# Altium footprint library WR-DSUB.PcbLib: 64 footprints (part 4 of 4)
Each footprint in its own frame and in the unit in brackets; x right, y up, seen from the top. Pads: shape width x height; smd on the part's side, far side on the other; paste and mask are expansions set on the pad; w line width, h text height; cw(c..) or ccw(c..) is an arc to the next point about the centre after c.
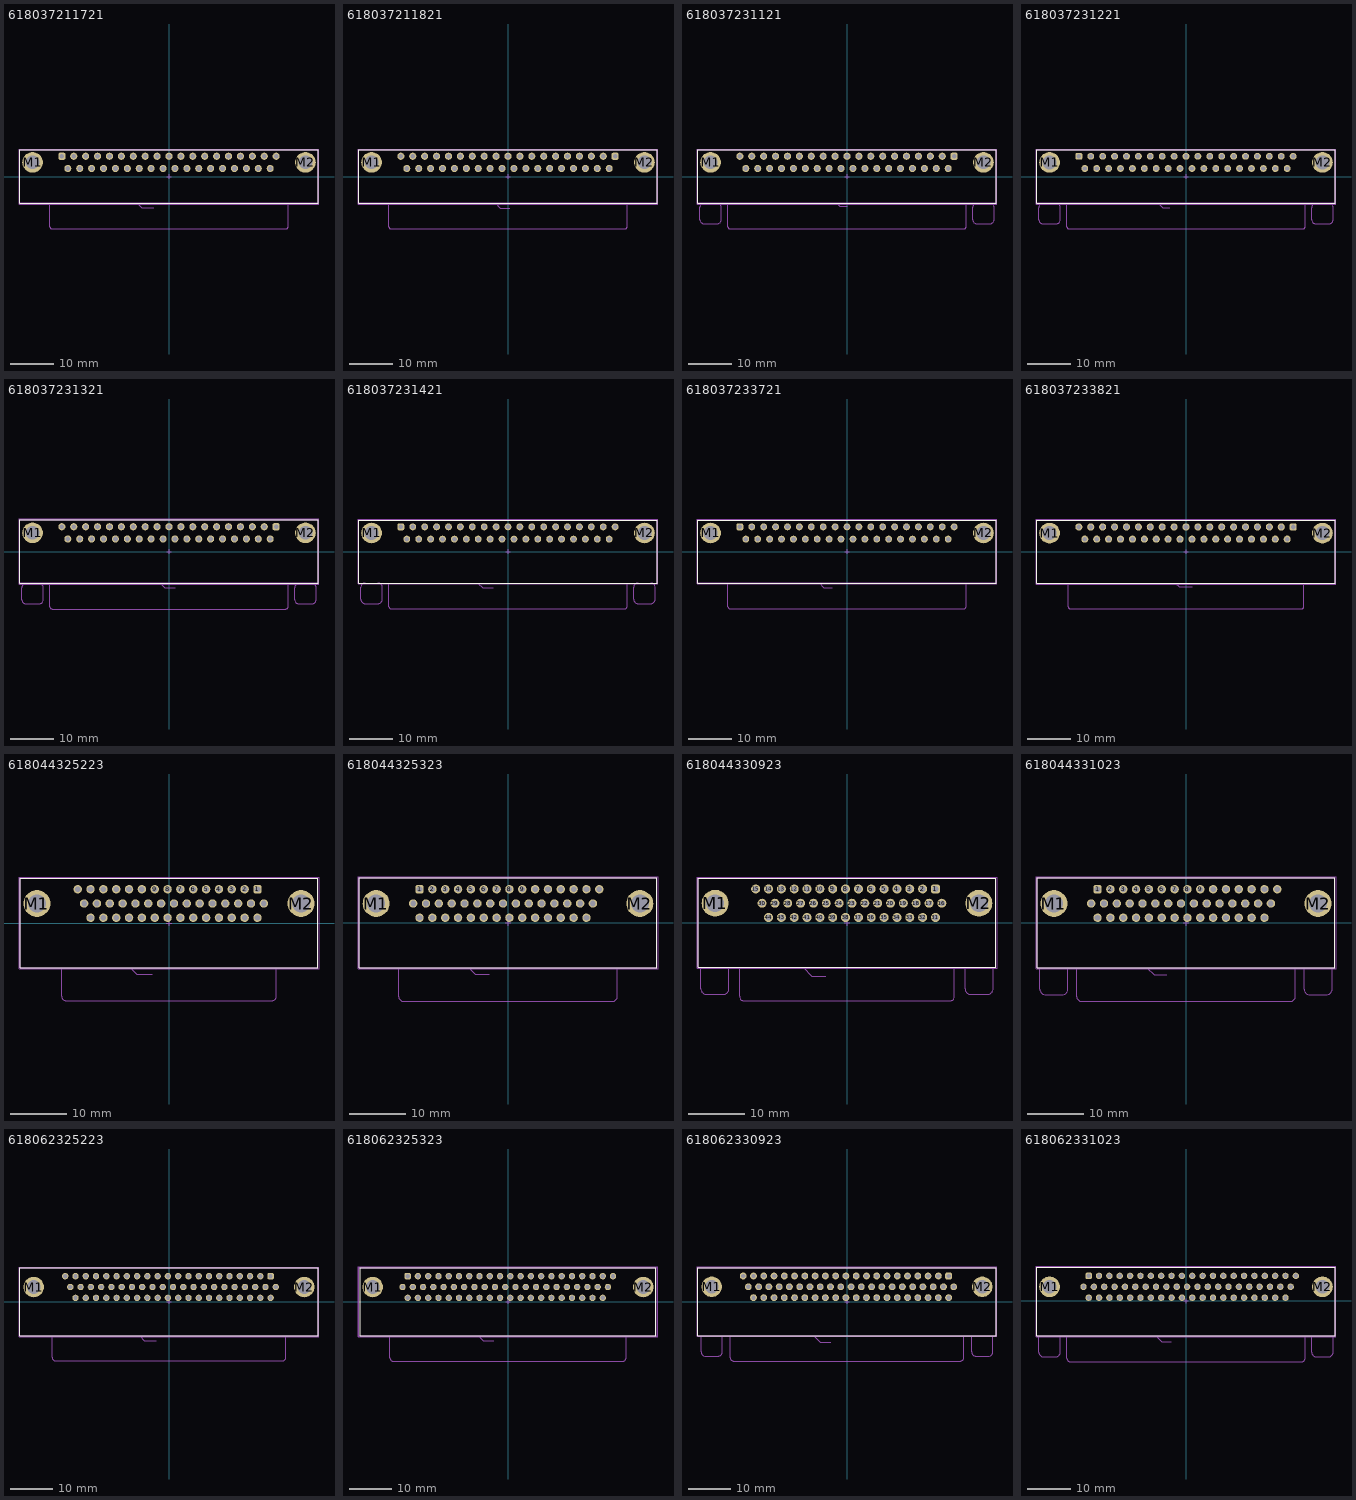
[diagram p3: the footprints below, top view; thin cyan lines are the x and y axes]

## 618037211721 [mm] "37 pins, right angled, 8.08mm, board lock & UNC4-40 rivet without hex screw"
height 12.5
pads (39):
  rrect50% 1.65x1.65 hole 1.09: 1(-24.93,4.72)
  round 1.65 hole 1.09: 2(-22.16,4.72) 3(-19.39,4.72) 4(-16.62,4.72) 5(-13.85,4.72) 6(-11.08,4.72) 7(-8.31,4.72) 8(-5.54,4.72) 9(-2.77,4.72) 10(0,4.72) 11(2.77,4.72) 12(5.54,4.72) 13(8.31,4.72) 14(11.08,4.72) 15(13.85,4.72) 16(16.62,4.72) 17(19.39,4.72) 18(22.16,4.72) 19(24.93,4.72) 20(-23.545,1.88) 21(-20.775,1.88) 22(-18.005,1.88) 23(-15.235,1.88) 24(-12.465,1.88) 25(-9.695,1.88) 26(-6.925,1.88) 27(-4.155,1.88) 28(-1.385,1.88) 29(1.385,1.88) 30(4.155,1.88) 31(6.925,1.88) 32(9.695,1.88) 33(12.465,1.88) 34(15.235,1.88) 35(18.005,1.88) 36(20.775,1.88) 37(23.545,1.88)
  round 4.8 hole 3.2: M1(-31.75,3.3) M2(31.75,3.3)
Top Overlay:
  lines w0.2: -34.7,-6.2 34.7,-6.2 34.7,6.2 -34.7,6.2 -34.7,-6.2
Assembly Notes:
  lines w0.2: -34.7,-6.12 34.7,-6.12 ; -7.5,-6.12 -6.32,-7.3 -3.6,-7.3
  text "PCB Edge" at -3.1,-7.8 h1.02
Top Assembly:
  lines w0.1: -27.71,-6.2 -27.71,-11.7 ccw(c-27.21,-11.7) -27.21,-12.2 27.21,-12.2 ccw(c27.21,-11.7) 27.71,-11.7 27.71,-6.2 ; -34.7,-6.2 -34.7,6.2 34.7,6.2 34.7,-6.2 -34.7,-6.2
Top Designator:
  text ".Designator" at -3.647,-0.357 h1
Top Courtyard:
  lines w0.05: -34.9,-6.4 34.9,-6.4 34.9,6.4 -34.9,6.4 -34.9,-6.4
Top Component Center:
  lines w0.1: -0.5,0 0.5,0 ; 0,-0.5 0,0.5
3D body "618037211721.stp": height 12.55, standoff -3.95, extent -34.7,-12.2 34.7,6.2

## 618037211821 [mm] "37p 8.08mm bracket, board lock & UNC4-40 Rivet without hex screw"
height 12.5
pads (39):
  rrect50% 1.65x1.65 hole 1.09: 1(24.93,4.72)
  round 1.65 hole 1.09: 2(22.16,4.72) 3(19.39,4.72) 4(16.62,4.72) 5(13.85,4.72) 6(11.08,4.72) 7(8.31,4.72) 8(5.54,4.72) 9(2.77,4.72) 10(0,4.72) 11(-2.77,4.72) 12(-5.54,4.72) 13(-8.31,4.72) 14(-11.08,4.72) 15(-13.85,4.72) 16(-16.62,4.72) 17(-19.39,4.72) 18(-22.16,4.72) 19(-24.93,4.72) 20(23.545,1.88) 21(20.775,1.88) 22(18.005,1.88) 23(15.235,1.88) 24(12.465,1.88) 25(9.695,1.88) 26(6.925,1.88) 27(4.155,1.88) 28(1.385,1.88) 29(-1.385,1.88) 30(-4.155,1.88) 31(-6.925,1.88) 32(-9.695,1.88) 33(-12.465,1.88) 34(-15.235,1.88) 35(-18.005,1.88) 36(-20.775,1.88) 37(-23.545,1.88)
  round 4.8 hole 3.2: M1(-31.75,3.3) M2(31.75,3.3)
Top Overlay:
  lines w0.2: -34.7,-6.2 34.7,-6.2 34.7,6.2 -34.7,6.2 -34.7,-6.2
Assembly Notes:
  lines w0.2: -34.7,-6.12 34.7,-6.12 ; -3,-6.12 -1.77,-7.35 0.4,-7.35
  text "PCB Edge" at 0.7,-8.05 h1.02
Top Assembly:
  lines w0.1: -27.7,-6.2 -27.7,-11.7 ccw(c-27.2,-11.7) -27.2,-12.2 ; -27.25,-12.2 27.2,-12.2 ccw(c27.2,-11.7) 27.7,-11.7 27.7,-6.2 ; -34.7,-6.2 -34.7,6.2 34.7,6.2 34.7,-6.2 -34.7,-6.2
Top Designator:
  text ".Designator" at -3.647,-0.357 h1
Top Courtyard:
  lines w0.05: -34.9,-6.4 34.9,-6.4 34.9,6.4 -34.9,6.4 -34.9,-6.4
Top Component Center:
  lines w0.1: -0.5,0 0.5,0 ; 0,-0.5 0,0.5
3D body "618037211821.stp": height 12.55, standoff -3.95, extent -34.7,-12.2 34.7,6.2

## 618037231121 [mm] "37 pins, right angled, 8.08mm, with hex screw"
height 12.5
pads (39):
  rrect50% 1.65x1.65 hole 1.09: 1(24.93,4.72)
  round 1.65 hole 1.09: 2(22.16,4.72) 3(19.39,4.72) 4(16.62,4.72) 5(13.85,4.72) 6(11.08,4.72) 7(8.31,4.72) 8(5.54,4.72) 9(2.77,4.72) 10(0,4.72) 11(-2.77,4.72) 12(-5.54,4.72) 13(-8.31,4.72) 14(-11.08,4.72) 15(-13.85,4.72) 16(-16.62,4.72) 17(-19.39,4.72) 18(-22.16,4.72) 19(-24.93,4.72) 20(23.545,1.88) 21(20.775,1.88) 22(18.005,1.88) 23(15.235,1.88) 24(12.465,1.88) 25(9.695,1.88) 26(6.925,1.88) 27(4.155,1.88) 28(1.385,1.88) 29(-1.385,1.88) 30(-4.155,1.88) 31(-6.925,1.88) 32(-9.695,1.88) 33(-12.465,1.88) 34(-15.235,1.88) 35(-18.005,1.88) 36(-20.775,1.88) 37(-23.545,1.88)
  round 4.8 hole 3.2: M1(-31.75,3.3) M2(31.75,3.3)
Top Overlay:
  lines w0.2: -34.7,-6.2 34.7,-6.2 34.7,6.2 -34.7,6.2 -34.7,-6.2
Assembly Notes:
  lines w0.2: -34.7,-6.12 34.7,-6.12 ; -2.5,-6.12 -1.67,-6.95 0,-6.95
  text "PCB Edge" at 0.4,-7.55 h1.02
Top Assembly:
  lines w0.1: -33.25,-6.2 ccw(c-33.25,-7.2) -34.25,-7.2 -34.25,-10 ccw(c-33.25,-10) -33.25,-11 -30.25,-11 ccw(c-30.25,-10) -29.25,-10 -29.25,-7.2 ccw(c-30.25,-7.2) -30.25,-6.2 ; -27.7,-6.2 -27.7,-11.7 ccw(c-27.2,-11.7) -27.2,-12.2 27.2,-12.2 ccw(c27.2,-11.7) 27.7,-11.7 27.7,-6.2 ; 30.25,-6.2 ccw(c30.25,-7.2) 29.25,-7.2 29.25,-10 ccw(c30.25,-10) 30.25,-11 33.25,-11 ccw(c33.25,-10) 34.25,-10 34.25,-7.2 ccw(c33.25,-7.2) 33.25,-6.2 ; -34.7,-6.2 34.7,-6.2 34.7,6.25 -34.7,6.25 -34.7,-6.2 ; 18.81,-12.2 18.81,-12.2
Top Designator:
  text ".Designator" at -3.647,-0.357 h1
Top Courtyard:
  lines w0.05: -34.9,-6.4 -34.9,6.4 34.9,6.4 34.9,-6.4 -34.9,-6.4
Top Component Center:
  lines w0.1: -0.5,0 0.5,0 ; 0,-0.5 0,0.5
3D body "618037231121.stp": height 12.55, standoff -3.95, extent -34.7,-12.15 34.7,6.25

## 618037231221 [mm] "37 pins, right angled, 8.08mm, with hex screw"
height 12.5
pads (39):
  rrect50% 1.6x1.6 hole 1.04: 1(-24.93,4.72)
  round 1.6 hole 1.04: 2(-22.16,4.72) 3(-19.39,4.72) 4(-16.62,4.72) 5(-13.85,4.72) 6(-11.08,4.72) 7(-8.31,4.72) 8(-5.54,4.72) 9(-2.77,4.72) 10(0,4.72) 11(2.77,4.72) 12(5.54,4.72) 13(8.31,4.72) 14(11.08,4.72) 15(13.85,4.72) 16(16.62,4.72) 17(19.39,4.72) 18(22.16,4.72) 19(24.93,4.72) 20(-23.545,1.88) 21(-20.775,1.88) 22(-18.005,1.88) 23(-15.235,1.88) 24(-12.465,1.88) 25(-9.695,1.88) 26(-6.925,1.88) 27(-4.155,1.88) 28(-1.385,1.88) 29(1.385,1.88) 30(4.155,1.88) 31(6.925,1.88) 32(9.695,1.88) 33(12.465,1.88) 34(15.235,1.88) 35(18.005,1.88) 36(20.775,1.88) 37(23.545,1.88)
  round 4.8 hole 3.2: M1(-31.75,3.3) M2(31.75,3.3)
Top Overlay:
  lines w0.2: -34.7,-6.2 34.7,-6.2 34.7,6.2 -34.7,6.2 -34.7,-6.2
Assembly Notes:
  lines w0.2: -34.7,-6.12 34.7,-6.12 ; -6.6,-6.12 -5.42,-7.3 -3.8,-7.3
  text "PCB Edge" at -3.4,-7.82 h1.02
Top Assembly:
  lines w0.1: -33.25,-6.2 ccw(c-33.25,-7.2) -34.25,-7.2 -34.25,-10 ccw(c-33.25,-10) -33.25,-11 -30.25,-11 ccw(c-30.25,-10) -29.25,-10 -29.25,-7.2 ccw(c-30.25,-7.2) -30.25,-6.2 ; -27.71,-6.2 -27.71,-11.68 ccw(c-27.21,-11.68) -27.21,-12.18 27.21,-12.18 ccw(c27.21,-11.68) 27.71,-11.68 27.71,-6.2 ; 30.25,-6.2 ccw(c30.25,-7.2) 29.25,-7.2 29.25,-10 ccw(c30.25,-10) 30.25,-11 33.25,-11 ccw(c33.25,-10) 34.25,-10 34.25,-7.2 ccw(c33.25,-7.2) 33.25,-6.2 ; -34.7,-6.2 -34.7,6.2 34.7,6.2 34.7,-6.2 -34.7,-6.2
Top Designator:
  text ".Designator" at -3.647,-0.357 h1
Top Courtyard:
  lines w0.05: -34.9,-6.4 -34.9,6.4 34.9,6.4 34.9,-6.4 -34.9,-6.4
Top Component Center:
  lines w0.1: -0.5,0 0.5,0 ; 0,-0.5 0,0.5
3D body "618037231221.stp": height 12.55, standoff -3.95, extent -34.7,-12.2 34.7,6.2

## 618037231321 [mm] "37 pins, right angled, 10.3mm, with hex screw"
height 12.5
pads (39):
  rrect50% 1.65x1.65 hole 1.09: 1(24.93,5.78)
  round 1.65 hole 1.09: 2(22.16,5.78) 3(19.39,5.78) 4(16.62,5.78) 5(13.85,5.78) 6(11.08,5.78) 7(8.31,5.78) 8(5.54,5.78) 9(2.77,5.78) 10(0,5.78) 11(-2.77,5.78) 12(-5.54,5.78) 13(-8.31,5.78) 14(-11.08,5.78) 15(-13.85,5.78) 16(-16.62,5.78) 17(-19.39,5.78) 18(-22.16,5.78) 19(-24.93,5.78) 20(23.545,2.94) 21(20.775,2.94) 22(18.005,2.94) 23(15.235,2.94) 24(12.465,2.94) 25(9.695,2.94) 26(6.925,2.94) 27(4.155,2.94) 28(1.385,2.94) 29(-1.385,2.94) 30(-4.155,2.94) 31(-6.925,2.94) 32(-9.695,2.94) 33(-12.465,2.94) 34(-15.235,2.94) 35(-18.005,2.94) 36(-20.775,2.94) 37(-23.545,2.94)
  round 4.8 hole 3.2: M1(-31.75,4.36) M2(31.75,4.36)
Top Overlay:
  lines w0.2: -34.7,-7.36 34.7,-7.36 34.7,7.37 -34.7,7.37 -34.7,-7.36
Assembly Notes:
  lines w0.2: -34.7,-7.26 34.7,-7.26 ; -2.1,-7.26 -0.96,-8.4 1.4,-8.4
  text "PCB Edge" at 1.8,-8.8 h1.02
Top Assembly:
  lines w0.1: -33.25,-7.36 ccw(c-33.25,-8.36) -34.25,-8.36 -34.25,-11.16 ccw(c-33.25,-11.16) -33.25,-12.16 -30.25,-12.16 ccw(c-30.25,-11.16) -29.25,-11.16 -29.25,-8.36 ccw(c-30.25,-8.36) -30.25,-7.36 ; -27.7,-7.36 -27.7,-12.86 ccw(c-27.2,-12.86) -27.2,-13.36 27.2,-13.36 ; 27.7,-7.36 27.7,-12.86 cw(c27.2,-12.86) 27.2,-13.36 ; 30.25,-7.36 ccw(c30.25,-8.36) 29.25,-8.36 29.25,-11.16 ccw(c30.25,-11.16) 30.25,-12.16 33.25,-12.16 ccw(c33.25,-11.16) 34.25,-11.16 34.25,-8.36 ccw(c33.25,-8.36) 33.25,-7.36 ; 27.2,-13.36 27.2,-13.36 ; -34.7,-7.36 -34.7,7.37 34.7,7.37 34.7,-7.36 -34.7,-7.36
Top Designator:
  text ".Designator" at -3.647,-0.357 h1
Top Courtyard:
  lines w0.05: -34.9,-7.59 -34.9,7.59 34.9,7.59 34.9,-7.59 -34.9,-7.59
Top Component Center:
  lines w0.1: -0.5,0 0.5,0 ; 0,-0.5 0,0.5
3D body "618037231321.stp": height 12.57, standoff -3.77, extent -34.66,-13.28 34.66,7.37

## 618037231421 [mm] "37 pins, right angled, 10.3mm, with hex screw"
height 12.5
pads (39):
  rrect50% 1.6x1.6 hole 1.09: 1(-24.93,5.735)
  round 1.6 hole 1.09: 2(-22.16,5.735) 3(-19.39,5.735) 4(-16.62,5.735) 5(-13.85,5.735) 6(-11.08,5.735) 7(-8.31,5.735) 8(-5.54,5.735) 9(-2.77,5.735) 10(0,5.735) 11(2.77,5.735) 12(5.54,5.735) 13(8.31,5.735) 14(11.08,5.735) 15(13.85,5.735) 16(16.62,5.735) 17(19.39,5.735) 18(22.16,5.735) 19(24.93,5.735) 20(-23.545,2.895) 21(-20.775,2.895) 22(-18.005,2.895) 23(-15.235,2.895) 24(-12.465,2.895) 25(-9.695,2.895) 26(-6.925,2.895) 27(-4.155,2.895) 28(-1.385,2.895) 29(1.385,2.895) 30(4.155,2.895) 31(6.925,2.895) 32(9.695,2.895) 33(12.465,2.895) 34(15.235,2.895) 35(18.005,2.895) 36(20.775,2.895) 37(23.545,2.895)
  round 4.8 hole 3.2: M1(-31.75,4.315) M2(31.75,4.315)
Top Overlay:
  lines w0.2: -34.7,-7.325 -34.7,7.325 34.7,7.325 34.7,-7.325 -34.7,-7.325
Assembly Notes:
  lines w0.2: -34.7,-7.325 34.7,-7.325 ; -7,-7.325 -5.905,-8.42 -3.4,-8.42
  text "PCB Edge" at -3.1,-8.92 h1.02
Top Assembly:
  lines w0.1: -33.25,-7.325 ccw(c-33.25,-8.325) -34.25,-8.325 -34.25,-11.125 ccw(c-33.25,-11.125) -33.25,-12.125 -30.25,-12.125 ccw(c-30.25,-11.125) -29.25,-11.125 -29.25,-8.325 ccw(c-30.25,-8.325) -30.25,-7.325 ; -27.71,-7.325 -27.71,-12.825 ccw(c-27.21,-12.825) -27.21,-13.325 27.21,-13.325 ccw(c27.21,-12.825) 27.71,-12.825 27.71,-7.325 ; 30.25,-7.325 ccw(c30.25,-8.325) 29.25,-8.325 29.25,-11.125 ccw(c30.25,-11.125) 30.25,-12.125 33.25,-12.125 ccw(c33.25,-11.125) 34.25,-11.125 34.25,-8.325 ccw(c33.25,-8.325) 33.25,-7.325 ; -34.7,-7.325 34.7,-7.325 34.7,7.325 -34.7,7.325 -34.7,-7.325
Top Designator:
  text ".Designator" at -3.647,-0.357 h1
Top Courtyard:
  lines w0.05: -34.9,-7.525 34.9,-7.525 34.9,7.525 -34.9,7.525 -34.9,-7.525
Top Component Center:
  lines w0.1: -0.5,0 0.5,0 ; 0,-0.5 0,0.5
3D body "618037231421.stp": height 12.62, standoff -3.72, extent -34.66,-13.355 34.66,7.295

## 618037233721 [mm] "37 pins, right angled, 10.3mm, board lock & UNC4-40 rivet without hex screw"
height 12.5
pads (39):
  rrect50% 1.6x1.6 hole 1.09: 1(-24.93,5.735)
  round 1.6 hole 1.09: 2(-22.16,5.735) 3(-19.39,5.735) 4(-16.62,5.735) 5(-13.85,5.735) 6(-11.08,5.735) 7(-8.31,5.735) 8(-5.54,5.735) 9(-2.77,5.735) 10(0,5.735) 11(2.77,5.735) 12(5.54,5.735) 13(8.31,5.735) 14(11.08,5.735) 15(13.85,5.735) 16(16.62,5.735) 17(19.39,5.735) 18(22.16,5.735) 19(24.93,5.735) 20(-23.545,2.895) 21(-20.775,2.895) 22(-18.005,2.895) 23(-15.235,2.895) 24(-12.465,2.895) 25(-9.695,2.895) 26(-6.925,2.895) 27(-4.155,2.895) 28(-1.385,2.895) 29(1.385,2.895) 30(4.155,2.895) 31(6.925,2.895) 32(9.695,2.895) 33(12.465,2.895) 34(15.235,2.895) 35(18.005,2.895) 36(20.775,2.895) 37(23.545,2.895)
  round 4.8 hole 3.2: M1(-31.75,4.315) M2(31.75,4.315)
Top Overlay:
  lines w0.2: -34.7,-7.325 -34.7,7.325 34.7,7.325 34.7,-7.325 -34.7,-7.325
Assembly Notes:
  lines w0.2: -34.7,-7.305 34.7,-7.305 ; -6.5,-7.305 -5.405,-8.4 -3.4,-8.4
  text "PCB Edge" at -3.1,-9 h1.02
Top Assembly:
  lines w0.1: -27.71,-7.325 -27.71,-12.825 ccw(c-27.21,-12.825) -27.21,-13.325 27.21,-13.325 ccw(c27.21,-12.825) 27.71,-12.825 27.71,-7.325 ; -34.7,-7.325 34.7,-7.325 34.7,7.325 -34.7,7.325 -34.7,-7.325
Top Designator:
  text ".Designator" at -3.647,-0.357 h1
Top Courtyard:
  lines w0.05: -34.9,-7.525 -34.9,7.525 34.9,7.525 34.9,-7.525 -34.9,-7.525
Top Component Center:
  lines w0.1: -0.5,0 0.5,0 ; 0,-0.5 0,0.5
3D body "618037233721.stp": height 12.57, standoff -3.77, extent -34.663,-13.325 34.663,7.325

## 618037233821 [mm] "37p 10.3mm bracket, board lock & UNC4-40 Rivet without hex screw"
height 12.5
pads (39):
  rrect50% 1.65x1.65 hole 1.09: 1(24.93,5.765)
  round 1.65 hole 1.09: 2(22.16,5.765) 3(19.39,5.765) 4(16.62,5.765) 5(13.85,5.765) 6(11.08,5.765) 7(8.31,5.765) 8(5.54,5.765) 9(2.77,5.765) 10(0,5.765) 11(-2.77,5.765) 12(-5.54,5.765) 13(-8.31,5.765) 14(-11.08,5.765) 15(-13.85,5.765) 16(-16.62,5.765) 17(-19.39,5.765) 18(-22.16,5.765) 19(-24.93,5.765) 20(23.545,2.925) 21(20.775,2.925) 22(18.005,2.925) 23(15.235,2.925) 24(12.465,2.925) 25(9.695,2.925) 26(6.925,2.925) 27(4.155,2.925) 28(1.385,2.925) 29(-1.385,2.925) 30(-4.155,2.925) 31(-6.925,2.925) 32(-9.695,2.925) 33(-12.465,2.925) 34(-15.235,2.925) 35(-18.005,2.925) 36(-20.775,2.925) 37(-23.545,2.925)
  round 4.8 hole 3.2: M1(-31.75,4.345) M2(31.75,4.345)
Top Overlay:
  lines w0.2: -34.7,-7.275 34.7,-7.275 34.7,7.375 -34.7,7.375 -34.7,-7.275
Assembly Notes:
  lines w0.2: -34.7,-7.275 34.7,-7.275 ; -2.5,-7.275 -1.575,-8.2 1.4,-8.2
  text "PCB Edge" at 1.8,-8.7 h1.02
Top Assembly:
  lines w0.1: -27.4,-7.275 -27.4,-12.775 ccw(c-26.9,-12.775) -26.9,-13.275 26.9,-13.275 ; 27.4,-7.275 27.4,-12.775 cw(c26.9,-12.775) 26.9,-13.275 ; 26.9,-13.275 26.9,-13.275 ; -34.7,-7.275 -34.7,7.375 34.7,7.375 34.7,-7.275 -34.7,-7.275
Top Designator:
  text ".Designator" at -3.647,-0.357 h1
Top Courtyard:
  lines w0.05: -34.9,-7.575 -34.9,7.575 34.9,7.575 34.9,-7.575 -34.9,-7.575
Top Component Center:
  lines w0.1: -0.5,0 0.5,0 ; 0,-0.5 0,0.5
3D body "618037233821.stp": height 12.57, standoff -3.77, extent -34.66,-13.275 34.66,7.375

## 618044325223 [mm] "44 pins, right angled with Rivet"
height 12.5
pads (46):
  rrect50% 1.5x1.5 hole 1: 1(15.776,6.02)
  round 1.5 hole 1: 2(13.486,6.02) 3(11.196,6.02) 4(8.906,6.02) 5(6.616,6.02) 6(4.326,6.02) 7(2.036,6.02) 8(-0.254,6.02) 9(-2.544,6.02) 10(-4.834,6.02) 11(-7.124,6.02) 12(-9.414,6.02) 13(-11.704,6.02) 14(-13.994,6.02) 15(-16.284,6.02) 16(16.916,3.48) 17(14.626,3.48) 18(12.336,3.48) 19(10.046,3.48) 20(7.756,3.48) 21(5.466,3.48) 22(3.176,3.48) 23(0.886,3.48) 24(-1.404,3.48) 25(-3.694,3.48) 26(-5.984,3.48) 27(-8.274,3.48) 28(-10.564,3.48) 29(-12.854,3.48) 30(-15.144,3.48) 31(15.776,0.94) 32(13.486,0.94) 33(11.196,0.94) 34(8.906,0.94) 35(6.616,0.94) 36(4.326,0.94) 37(2.036,0.94) 38(-0.254,0.94) 39(-2.544,0.94) 40(-4.834,0.94) 41(-7.124,0.94) 42(-9.414,0.94) 43(-11.704,0.94) 44(-13.994,0.94)
  round 4.8 hole 3.2: M1(-23.55,3.48) M2(23.55,3.48)
Top Overlay:
  lines w0.2: -26.55,-7.95 -26.55,7.95 26.55,7.95 26.55,-7.95 -26.55,-7.95
Assembly Notes:
  lines w0.2: -26.55,-7.95 26.55,-7.95 ; -6.9,-7.95 -5.75,-9.1 -3,-9.1
  text "PCB Edge" at -2.6,-9.6 h1.02
Top Assembly:
  lines w0.1: -19.15,-7.95 -19.15,-13.05 ccw(c-18.35,-13.05) -18.35,-13.85 18.35,-13.85 ccw(c18.35,-13.05) 19.15,-13.05 19.15,-7.95 ; -26.55,-7.95 26.55,-7.95 26.55,7.95 -26.55,7.95 -26.55,-7.95
Top Designator:
  text ".Designator" at -3.647,-0.357 h1
Top Courtyard:
  lines w0.05: -26.75,-8.15 -26.75,8.15 26.75,8.15 26.75,-8.15 -26.75,-8.15
Top Component Center:
  lines w0.1: -0.5,0 0.5,0 ; 0,-0.5 0,0.5
3D body "618044325223.stp": height 12.55, standoff -3.9, extent -26.578,-13.85 26.553,7.95

## 618044325323 [mm] "44 pins, right angled without Hex Screw"
height 12.5
pads (46):
  rrect50% 1.5x1.5 hole 1: 1(-15.776,5.97)
  round 1.5 hole 1: 2(-13.486,5.97) 3(-11.196,5.97) 4(-8.906,5.97) 5(-6.616,5.97) 6(-4.326,5.97) 7(-2.036,5.97) 8(0.254,5.97) 9(2.544,5.97) 10(4.834,5.97) 11(7.124,5.97) 12(9.414,5.97) 13(11.704,5.97) 14(13.994,5.97) 15(16.284,5.97) 16(-16.916,3.43) 17(-14.626,3.43) 18(-12.336,3.43) 19(-10.046,3.43) 20(-7.756,3.43) 21(-5.466,3.43) 22(-3.176,3.43) 23(-0.886,3.43) 24(1.404,3.43) 25(3.694,3.43) 26(5.984,3.43) 27(8.274,3.43) 28(10.564,3.43) 29(12.854,3.43) 30(15.144,3.43) 31(-15.776,0.89) 32(-13.486,0.89) 33(-11.196,0.89) 34(-8.906,0.89) 35(-6.616,0.89) 36(-4.326,0.89) 37(-2.036,0.89) 38(0.254,0.89) 39(2.544,0.89) 40(4.834,0.89) 41(7.124,0.89) 42(9.414,0.89) 43(11.704,0.89) 44(13.994,0.89)
  round 4.8 hole 3.2: M1(-23.52,3.43) M2(23.52,3.43)
Top Overlay:
  lines w0.2: -26.55,-8 26.55,-8 26.55,8 -26.55,8 -26.55,-8
Assembly Notes:
  lines w0.2: -26.55,-8 26.55,-8 ; -7,-8 -5.8,-9.2 -3.3,-9.2
  text "PCB Edge" at -3,-9.75 h1.02
Top Assembly:
  lines w0.1: -19.48,-8 -19.48,-13.2 ccw(c-18.68,-13.2) -18.68,-14 18.68,-14 ccw(c18.68,-13.2) 19.48,-13.2 19.48,-8 ; -26.55,-8 -26.55,8 26.55,8 26.55,-8 -26.55,-8
Top Designator:
  text ".Designator" at -3.647,-0.357 h1
Top Courtyard:
  lines w0.05: -26.75,-8.2 -26.75,8.2 26.75,8.2 26.75,-8.2 -26.75,-8.2
Top Component Center:
  lines w0.1: -0.5,0 0.5,0 ; 0,-0.5 0,0.5
3D body "618044325323.stp": height 12.75, standoff -3.7, extent -26.55,-14 26.55,8

## 618044330923 [mm] "44 pins, right angled"
height 12.5
pads (46):
  rrect50% 1.6x1.6 hole 1.05: 1(15.776,6.02)
  round 1.6 hole 1.05: 2(13.486,6.02) 3(11.196,6.02) 4(8.906,6.02) 5(6.616,6.02) 6(4.326,6.02) 7(2.036,6.02) 8(-0.254,6.02) 9(-2.544,6.02) 10(-4.834,6.02) 11(-7.124,6.02) 12(-9.414,6.02) 13(-11.704,6.02) 14(-13.994,6.02) 15(-16.284,6.02) 16(16.916,3.48) 17(14.626,3.48) 18(12.336,3.48) 19(10.046,3.48) 20(7.756,3.48) 21(5.466,3.48) 22(3.176,3.48) 23(0.886,3.48) 24(-1.404,3.48) 25(-3.694,3.48) 26(-5.984,3.48) 27(-8.274,3.48) 28(-10.564,3.48) 29(-12.854,3.48) 30(-15.144,3.48) 31(15.776,0.94) 32(13.486,0.94) 33(11.196,0.94) 34(8.906,0.94) 35(6.616,0.94) 36(4.326,0.94) 37(2.036,0.94) 38(-0.254,0.94) 39(-2.544,0.94) 40(-4.834,0.94) 41(-7.124,0.94) 42(-9.414,0.94) 43(-11.704,0.94) 44(-13.994,0.94)
  round 4.8 hole 3.2: M1(-23.52,3.48) M2(23.52,3.48)
Top Overlay:
  lines w0.2: -26.55,-7.95 26.55,-7.95 26.55,7.95 -26.55,7.95 -26.55,-7.95
Assembly Notes:
  lines w0.2: -26.55,-7.95 26.55,-7.95 ; -7.8,-7.95 -6.25,-9.5 -3.8,-9.5
  text "PCB Edge" at -3.4,-10.02 h1.02
Top Assembly:
  lines w0.1: -26.05,-7.95 -26.05,-11.79 ccw(c-25.05,-11.79) -25.05,-12.79 -22.05,-12.79 ccw(c-22.05,-11.79) -21.05,-11.79 -21.05,-7.95 ; -19.15,-7.95 -19.15,-13.15 ccw(c-18.35,-13.15) -18.35,-13.95 18.32,-13.95 ; 18.35,-13.95 ccw(c18.35,-13.15) 19.15,-13.15 19.15,-7.95 ; 21.05,-7.95 21.05,-11.79 ccw(c22.05,-11.79) 22.05,-12.79 25.05,-12.79 ccw(c25.05,-11.79) 26.05,-11.79 26.05,-7.95 ; -26.55,-7.95 -26.55,7.95 26.55,7.95 26.55,-7.95 -26.55,-7.95
Top Designator:
  text ".Designator" at -3.647,-0.357 h1
Top Courtyard:
  lines w0.05: -26.75,-8.15 -26.75,8.15 26.75,8.15 26.75,-8.15 -26.75,-8.15
Top Component Center:
  lines w0.1: -0.5,0 0.5,0 ; 0,-0.5 0,0.5
3D body "618044330923.stp": height 12.55, standoff -3.9, extent -26.565,-13.85 26.565,7.95

## 618044331023 [mm] "44 pins, right angled with Hex Screw"
height 12.5
pads (46):
  rrect50% 1.5x1.5 hole 1: 1(-15.776,5.97)
  round 1.5 hole 1: 2(-13.486,5.97) 3(-11.196,5.97) 4(-8.906,5.97) 5(-6.616,5.97) 6(-4.326,5.97) 7(-2.036,5.97) 8(0.254,5.97) 9(2.544,5.97) 10(4.834,5.97) 11(7.124,5.97) 12(9.414,5.97) 13(11.704,5.97) 14(13.994,5.97) 15(16.284,5.97) 16(-16.916,3.43) 17(-14.626,3.43) 18(-12.336,3.43) 19(-10.046,3.43) 20(-7.756,3.43) 21(-5.466,3.43) 22(-3.176,3.43) 23(-0.886,3.43) 24(1.404,3.43) 25(3.694,3.43) 26(5.984,3.43) 27(8.274,3.43) 28(10.564,3.43) 29(12.854,3.43) 30(15.144,3.43) 31(-15.776,0.89) 32(-13.486,0.89) 33(-11.196,0.89) 34(-8.906,0.89) 35(-6.616,0.89) 36(-4.326,0.89) 37(-2.036,0.89) 38(0.254,0.89) 39(2.544,0.89) 40(4.834,0.89) 41(7.124,0.89) 42(9.414,0.89) 43(11.704,0.89) 44(13.994,0.89)
  round 4.8 hole 3.2: M1(-23.55,3.43) M2(23.55,3.43)
Top Overlay:
  lines w0.2: -26.55,-8 26.55,-8 26.55,8 -26.55,8 -26.55,-8
Assembly Notes:
  lines w0.2: -26.55,-8 26.55,-8 ; -7,-8 -5.7,-9.3 -3.4,-9.3
  text "PCB Edge" at -3.1,-9.75 h1.02
Top Assembly:
  lines w0.1: -26.05,-8 -26.05,-11.84 ccw(c-25.05,-11.84) -25.05,-12.84 -22.05,-12.84 ccw(c-22.05,-11.84) -21.05,-11.84 -21.05,-8 ; -19.48,-8 -19.48,-13.2 ccw(c-18.68,-13.2) -18.68,-14 18.68,-14 ccw(c18.68,-13.2) 19.48,-13.2 19.48,-8 ; 21.05,-8 21.05,-11.84 ccw(c22.05,-11.84) 22.05,-12.84 25.05,-12.84 ccw(c25.05,-11.84) 26.05,-11.84 26.05,-8 ; -26.55,-8 -26.55,8 26.55,8 26.55,-8 -26.55,-8
Top Designator:
  text ".Designator" at -3.647,-0.357 h1
Top Courtyard:
  lines w0.05: -26.75,-8.2 26.75,-8.2 26.75,8.2 -26.75,8.2 -26.75,-8.2
Top Component Center:
  lines w0.1: -0.5,0 0.5,0 ; 0,-0.5 0,0.5
3D body "618044331023.stp": height 12.55, standoff -3.9, extent -26.565,-14 26.565,8

## 618062325223 [mm] "62 pins, right angled with Rivet"
height 12.5
pads (64):
  rrect50% 1.5x1.5 hole 1: 1(23.846,6.02)
  round 1.5 hole 1: 2(21.436,6.02) 3(19.026,6.02) 4(16.616,6.02) 5(14.206,6.02) 6(11.796,6.02) 7(9.386,6.02) 8(6.976,6.02) 9(4.566,6.02) 10(2.156,6.02) 11(-0.254,6.02) 12(-2.664,6.02) 13(-5.074,6.02) 14(-7.484,6.02) 15(-9.894,6.02) 16(-12.304,6.02) 17(-14.714,6.02) 18(-17.124,6.02) 19(-19.534,6.02) 20(-21.944,6.02) 21(-24.354,6.02) 22(25.046,3.48) 23(22.636,3.48) 24(20.226,3.48) 25(17.816,3.48) 26(15.406,3.48) 27(12.996,3.48) 28(10.586,3.48) 29(8.176,3.48) 30(5.766,3.48) 31(3.356,3.48) 32(0.946,3.48) 33(-1.464,3.48) 34(-3.874,3.48) 35(-6.284,3.48) 36(-8.694,3.48) 37(-11.104,3.48) 38(-13.514,3.48) 39(-15.924,3.48) 40(-18.334,3.48) 41(-20.744,3.48) 42(-23.154,3.48) 43(23.846,0.94) 44(21.436,0.94) 45(19.026,0.94) 46(16.616,0.94) 47(14.206,0.94) 48(11.796,0.94) 49(9.386,0.94) 50(6.976,0.94) 51(4.566,0.94) 52(2.156,0.94) 53(-0.254,0.94) 54(-2.664,0.94) 55(-5.074,0.94) 56(-7.484,0.94) 57(-9.894,0.94) 58(-12.304,0.94) 59(-14.714,0.94) 60(-17.124,0.94) 61(-19.534,0.94) 62(-21.944,0.94)
  round 4.8 hole 3.2: M1(-31.75,3.48) M2(31.75,3.48)
Top Overlay:
  lines w0.2: -35,-7.95 -35,7.95 35,7.95 35,-7.95 -35,-7.95
Assembly Notes:
  lines w0.2: -34.7,-7.95 34.7,-7.95 ; -6.9,-7.95 -5.75,-9.1 -3,-9.1
  text "PCB Edge" at -2.6,-9.6 h1.02
Top Assembly:
  lines w0.1: -35,7.95 35,7.95 35,-7.95 -34.997,-7.95 -34.997,7.95 ; -27.4,-7.95 -27.4,-13.05 ccw(c-26.6,-13.05) -26.6,-13.85 26.6,-13.85 ccw(c26.6,-13.05) 27.4,-13.05 27.4,-7.95
Top Designator:
  text ".Designator" at -3.647,-0.357 h1
Top Courtyard:
  lines w0.05: -35.2,-8.15 -35.2,8.15 35.2,8.15 35.2,-8.15 -35.2,-8.15
Top Component Center:
  lines w0.1: -0.5,0 0.5,0 ; 0,-0.5 0,0.5
3D body "618062325223.stp": height 12.55, standoff -3.9, extent -34.997,-13.85 35.003,7.95

## 618062325323 [mm] "62 pins, right angled without Hex Screw"
height 12.5
pads (64):
  rrect50% 1.5x1.5 hole 1: 1(-23.55,5.97)
  round 1.5 hole 1: 2(-21.14,5.97) 3(-18.73,5.97) 4(-16.32,5.97) 5(-13.91,5.97) 6(-11.5,5.97) 7(-9.09,5.97) 8(-6.68,5.97) 9(-4.27,5.97) 10(-1.86,5.97) 11(0.55,5.97) 12(2.96,5.97) 13(5.37,5.97) 14(7.78,5.97) 15(10.19,5.97) 16(12.6,5.97) 17(15.01,5.97) 18(17.42,5.97) 19(19.83,5.97) 20(22.24,5.97) 21(24.65,5.97) 22(-24.75,3.43) 23(-22.34,3.43) 24(-19.93,3.43) 25(-17.52,3.43) 26(-15.11,3.43) 27(-12.7,3.43) 28(-10.29,3.43) 29(-7.88,3.43) 30(-5.47,3.43) 31(-3.06,3.43) 32(-0.65,3.43) 33(1.76,3.43) 34(4.17,3.43) 35(6.58,3.43) 36(8.99,3.43) 37(11.4,3.43) 38(13.81,3.43) 39(16.22,3.43) 40(18.63,3.43) 41(21.04,3.43) 42(23.45,3.43) 43(-23.55,0.89) 44(-21.14,0.89) 45(-18.73,0.89) 46(-16.32,0.89) 47(-13.91,0.89) 48(-11.5,0.89) 49(-9.09,0.89) 50(-6.68,0.89) 51(-4.27,0.89) 52(-1.86,0.89) 53(0.55,0.89) 54(2.96,0.89) 55(5.37,0.89) 56(7.78,0.89) 57(10.19,0.89) 58(12.6,0.89) 59(15.01,0.89) 60(17.42,0.89) 61(19.83,0.89) 62(22.24,0.89)
  round 4.8 hole 3.2: M1(-31.75,3.43) M2(31.75,3.43)
Top Overlay:
  lines w0.2: -34.7,-8 34.7,-8 34.7,8 -34.7,8 -34.7,-8
Assembly Notes:
  lines w0.2: -34.7,-8 34.7,-8 ; -7,-8 -5.8,-9.2 -3.3,-9.2
  text "PCB Edge" at -3,-9.75 h1.02
Top Assembly:
  lines w0.1: -27.71,-8 -27.71,-13.2 ccw(c-26.91,-13.2) -26.91,-14 26.91,-14 ccw(c26.91,-13.2) 27.71,-13.2 27.71,-8 ; -35,-8 -35,8 35,8 35,-8 -35,-8
Top Designator:
  text ".Designator" at -3.647,-0.357 h1
Top Courtyard:
  lines w0.05: -35.2,-8.2 35.2,-8.2 35.2,8.2 -35.2,8.2 -35.2,-8.2
Top Component Center:
  lines w0.1: -0.5,0 0.5,0 ; 0,-0.5 0,0.5
3D body "618062325323.stp": height 12.75, standoff -3.75, extent -34.7,-14.075 34.7,8.225

## 618062330923 [mm] "62 pins, right angled"
height 12.5
pads (64):
  rrect50% 1.6x1.6 hole 1.05: 1(23.846,6.02)
  round 1.6 hole 1.05: 2(21.436,6.02) 3(19.026,6.02) 4(16.616,6.02) 5(14.206,6.02) 6(11.796,6.02) 7(9.386,6.02) 8(6.976,6.02) 9(4.566,6.02) 10(2.156,6.02) 11(-0.254,6.02) 12(-2.664,6.02) 13(-5.074,6.02) 14(-7.484,6.02) 15(-9.894,6.02) 16(-12.304,6.02) 17(-14.714,6.02) 18(-17.124,6.02) 19(-19.534,6.02) 20(-21.944,6.02) 21(-24.354,6.02) 22(25.046,3.48) 23(22.636,3.48) 24(20.226,3.48) 25(17.816,3.48) 26(15.406,3.48) 27(12.996,3.48) 28(10.586,3.48) 29(8.176,3.48) 30(5.766,3.48) 31(3.356,3.48) 32(0.946,3.48) 33(-1.464,3.48) 34(-3.874,3.48) 35(-6.284,3.48) 36(-8.694,3.48) 37(-11.104,3.48) 38(-13.514,3.48) 39(-15.924,3.48) 40(-18.334,3.48) 41(-20.744,3.48) 42(-23.154,3.48) 43(23.846,0.94) 44(21.436,0.94) 45(19.026,0.94) 46(16.616,0.94) 47(14.206,0.94) 48(11.796,0.94) 49(9.386,0.94) 50(6.976,0.94) 51(4.566,0.94) 52(2.156,0.94) 53(-0.254,0.94) 54(-2.664,0.94) 55(-5.074,0.94) 56(-7.484,0.94) 57(-9.894,0.94) 58(-12.304,0.94) 59(-14.714,0.94) 60(-17.124,0.94) 61(-19.534,0.94) 62(-21.944,0.94)
  round 4.8 hole 3.2: M1(-31.75,3.48) M2(31.75,3.48)
Top Overlay:
  lines w0.2: -35,-7.95 35,-7.95 35,7.95 -35,7.95 -35,-7.95
Assembly Notes:
  lines w0.2: -34.7,-7.95 34.7,-7.95 ; -7.8,-7.95 -6.25,-9.5 -3.8,-9.5
  text "PCB Edge" at -3.4,-10.02 h1.02
Top Assembly:
  lines w0.1: -34.25,-7.95 -34.25,-11.79 ccw(c-33.25,-11.79) -33.25,-12.79 -30.25,-12.79 ccw(c-30.25,-11.79) -29.25,-11.79 -29.25,-7.95 ; -27.4,-7.95 -27.4,-13.15 ccw(c-26.6,-13.15) -26.6,-13.95 26.6,-13.95 ccw(c26.6,-13.15) 27.4,-13.15 27.4,-7.95 ; 29.25,-7.95 29.25,-11.79 ccw(c30.25,-11.79) 30.25,-12.79 33.25,-12.79 ccw(c33.25,-11.79) 34.25,-11.79 34.25,-7.95 ; -35,-7.95 -35,7.95 35,7.95 35,-7.95 -35,-7.95
Top Designator:
  text ".Designator" at -3.647,-0.357 h1
Top Courtyard:
  lines w0.05: -35.2,-8.15 35.2,-8.15 35.2,8.15 -35.2,8.15 -35.2,-8.15
Top Component Center:
  lines w0.1: -0.5,0 0.5,0 ; 0,-0.5 0,0.5
3D body "618062330923.stp": height 12.55, standoff -3.9, extent -35,-13.85 35,7.95

## 618062331023 [mm] "62 pins, right angled with Hex Screw"
height 12.5
pads (64):
  rrect50% 1.5x1.5 hole 1: 1(-22.646,5.82)
  round 1.5 hole 1: 2(-20.236,5.82) 3(-17.826,5.82) 4(-15.416,5.82) 5(-13.006,5.82) 6(-10.596,5.82) 7(-8.186,5.82) 8(-5.776,5.82) 9(-3.366,5.82) 10(-0.956,5.82) 11(1.454,5.82) 12(3.864,5.82) 13(6.274,5.82) 14(8.684,5.82) 15(11.094,5.82) 16(13.504,5.82) 17(15.914,5.82) 18(18.324,5.82) 19(20.734,5.82) 20(23.144,5.82) 21(25.554,5.82) 22(-23.846,3.28) 23(-21.436,3.28) 24(-19.026,3.28) 25(-16.616,3.28) 26(-14.206,3.28) 27(-11.796,3.28) 28(-9.386,3.28) 29(-6.976,3.28) 30(-4.566,3.28) 31(-2.156,3.28) 32(0.254,3.28) 33(2.664,3.28) 34(5.074,3.28) 35(7.484,3.28) 36(9.894,3.28) 37(12.304,3.28) 38(14.714,3.28) 39(17.124,3.28) 40(19.534,3.28) 41(21.944,3.28) 42(24.354,3.28) 43(-22.636,0.74) 44(-20.226,0.74) 45(-17.816,0.74) 46(-15.406,0.74) 47(-12.996,0.74) 48(-10.586,0.74) 49(-8.176,0.74) 50(-5.766,0.74) 51(-3.356,0.74) 52(-0.946,0.74) 53(1.464,0.74) 54(3.874,0.74) 55(6.284,0.74) 56(8.694,0.74) 57(11.104,0.74) 58(13.514,0.74) 59(15.924,0.74) 60(18.334,0.74) 61(20.744,0.74) 62(23.154,0.74)
  round 4.8 hole 3.2: M1(-31.75,3.28) M2(31.75,3.28)
Top Overlay:
  lines w0.2: -34.7,-8.15 34.7,-8.15 34.7,7.85 -34.7,7.85 -34.7,-8.15
Assembly Notes:
  lines w0.2: -34.7,-8.15 34.7,-8.15 ; -7,-8.15 -5.7,-9.45 -3.4,-9.45
  text "PCB Edge" at -3.1,-9.9 h1.02
Top Assembly:
  lines w0.1: -34.25,-8.15 -34.25,-11.99 ccw(c-33.25,-11.99) -33.25,-12.99 -30.25,-12.99 ccw(c-30.25,-11.99) -29.25,-11.99 -29.25,-8.15 ; -27.71,-8.15 -27.71,-13.35 ccw(c-26.91,-13.35) -26.91,-14.15 26.91,-14.15 ccw(c26.91,-13.35) 27.71,-13.35 27.71,-8.15 ; 29.25,-8.15 29.25,-11.99 ccw(c30.25,-11.99) 30.25,-12.99 33.25,-12.99 ccw(c33.25,-11.99) 34.25,-11.99 34.25,-8.15 ; -34.7,-8.15 -34.7,7.85 34.7,7.85 34.7,-8.15 -34.7,-8.15
Top Designator:
  text ".Designator" at -3.647,-0.357 h1
Top Courtyard:
  lines w0.05: -34.9,-8.35 -34.9,8.05 34.9,8.05 34.9,-8.35 -34.9,-8.35
Top Component Center:
  lines w0.1: -0.5,0 0.5,0 ; 0,-0.5 0,0.5
3D body "618062331023.stp": height 12.55, standoff -3.9, extent -35,-14.15 35,7.85